# Altium footprint library 2019-09-12_16-27-42.PcbLib: 3 footprints
Each footprint in its own frame and in the unit in brackets; x right, y up, seen from the top. Pads: shape width x height; smd on the part's side, far side on the other; paste and mask are expansions set on the pad; w line width, h text height; cw(c..) or ccw(c..) is an arc to the next point about the centre after c.
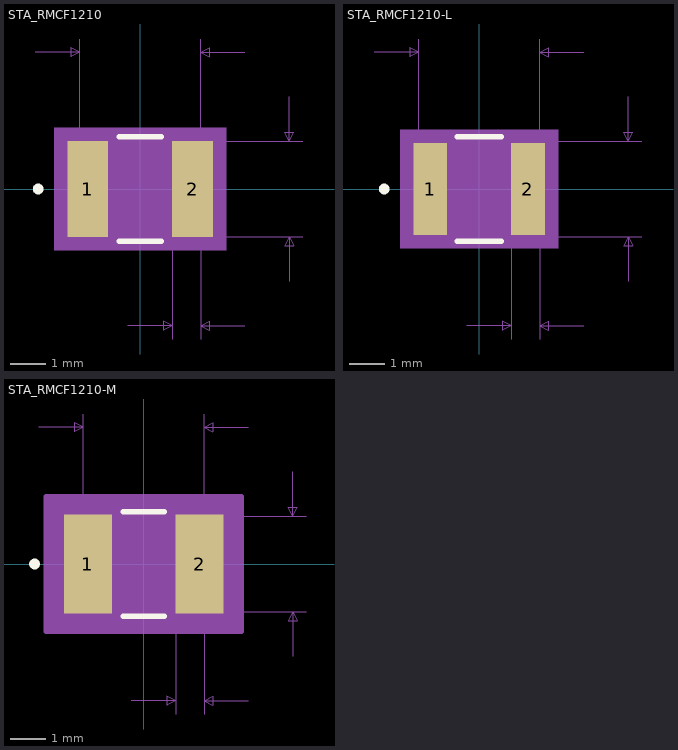
[diagram p0: the footprints below, top view; thin cyan lines are the x and y axes]

## STA_RMCF1210 [mil]
pads (2):
  rect 46x108 smd paste+0 mask+0: 1(-59,0) 2(59,0)
Top Overlay:
  circle w6: c-115,0 r3
  lines w6: -23.89,-59 23.89,-59 ; -23.89,59 23.89,59
Mechanical 5:
  region: 97,-69 -97,-69 -97,69 97,69
Mechanical 7:
  lines w1: -118,154 -68,154 ; -68,0 -68,169 ; -14,-154 36,-154 ; 0,-54 183,-54 ; 0,54 183,54 ; 36,-169 36,0 ; 68,-169 68,0 68,169 ; 118,-154 68,-154 ; 118,154 68,154 ; 168,-104 168,-54 ; 168,104 168,54 ; -68,154 -78,159 -78,149 -68,154 ; 36,-154 26,-149 26,-159 36,-154 ; 68,-154 78,-149 78,-159 68,-154 ; 68,154 78,159 78,149 68,154 ; 168,-54 163,-64 173,-64 168,-54 ; 168,54 163,64 173,64 168,54
  text "Default Padstyle: RX46Y108D0T" at -362.5,-324 h50
  text "Alt 1 Padstyle: OX60Y90D30P" at -337.5,-384 h50
  text "Alt 2 Padstyle: OX90Y60D30P" at -337.5,-444 h50
  text "0.108in/2.743mm" at 188,-12.5 h25
  text "0.136in/3.454mm" at -93.75,174 h25
  text "0.032in/0.813mm" at -41.75,-199 h25
Mechanical 13:
  circle w0: c-54,0 r3
  lines w1: -68,-54 -68,54 ; -68,-54 -36,-54 -36,54 -68,54 ; -68,-54 68,-54 ; -68,-54 -68,54 ; -68,54 68,54 ; 68,-54 36,-54 36,54 68,54 ; 68,-54 68,54 ; 68,-54 68,54
Mechanical 15:
  region: 92,-64 -92,-64 -92,64 92,64
  lines w6: -92,-64 -92,64 92,64 92,-64 -92,-64
3D body: height 10, standoff 0, extent 0,0 10,10

## STA_RMCF1210-L [mil]
pads (2):
  rect 38x104 smd paste+0 mask+0: 1(-55,0) 2(55,0)
Top Overlay:
  circle w6: c-107,0 r3
  lines w6: -24.93,-59 24.93,-59 ; -24.93,59 24.93,59
Mechanical 5:
  region: 89,-67 -89,-67 -89,67 89,67
Mechanical 7:
  lines w1: -118,154 -68,154 ; -68,0 -68,169 ; -14,-154 36,-154 ; 0,-54 183,-54 ; 0,54 183,54 ; 36,-169 36,0 ; 68,-169 68,0 68,169 ; 118,-154 68,-154 ; 118,154 68,154 ; 168,-104 168,-54 ; 168,104 168,54 ; -68,154 -78,159 -78,149 -68,154 ; 36,-154 26,-149 26,-159 36,-154 ; 68,-154 78,-149 78,-159 68,-154 ; 68,154 78,159 78,149 68,154 ; 168,-54 163,-64 173,-64 168,-54 ; 168,54 163,64 173,64 168,54
  text "Default Padstyle: RX38Y104D0T" at -362.5,-322 h50
  text "Alt 1 Padstyle: OX60Y90D30P" at -337.5,-382 h50
  text "Alt 2 Padstyle: OX90Y60D30P" at -337.5,-442 h50
  text "0.108in/2.743mm" at 188,-12.5 h25
  text "0.136in/3.454mm" at -93.75,174 h25
  text "0.032in/0.813mm" at -41.75,-199 h25
Mechanical 13:
  circle w0: c-50,0 r3
  lines w1: -68,-54 -68,54 ; -68,-54 -36,-54 -36,54 -68,54 ; -68,-54 68,-54 ; -68,-54 -68,54 ; -68,54 68,54 ; 68,-54 36,-54 36,54 68,54 ; 68,-54 68,54 ; 68,-54 68,54
Mechanical 15:
  region: 78,-56 -78,-56 -78,56 78,56
  lines w6: -78,-56 -78,56 78,56 78,-56 -78,-56
3D body: height 10, standoff 0, extent 0,0 10,10

## STA_RMCF1210-M [mil]
pads (2):
  rect 54x112 smd paste+0 mask+0: 1(-63,0) 2(63,0)
Top Overlay:
  circle w6: c-123,0 r3
  lines w6: -23.25,-59 23.25,-59 ; -23.25,59 23.25,59
Mechanical 5:
  region: 105,-71 -105,-71 -105,71 105,71
Mechanical 7:
  lines w1: -118,154 -68,154 ; -68,0 -68,169 ; -14,-154 36,-154 ; 0,-54 183,-54 ; 0,54 183,54 ; 36,-169 36,0 ; 68,-169 68,0 68,169 ; 118,-154 68,-154 ; 118,154 68,154 ; 168,-104 168,-54 ; 168,104 168,54 ; -68,154 -78,159 -78,149 -68,154 ; 36,-154 26,-149 26,-159 36,-154 ; 68,-154 78,-149 78,-159 68,-154 ; 68,154 78,159 78,149 68,154 ; 168,-54 163,-64 173,-64 168,-54 ; 168,54 163,64 173,64 168,54
  text "Default Padstyle: RX54Y112D0T" at -362.5,-326 h50
  text "Alt 1 Padstyle: OX60Y90D30P" at -337.5,-386 h50
  text "Alt 2 Padstyle: OX90Y60D30P" at -337.5,-446 h50
  text "0.108in/2.743mm" at 188,-12.5 h25
  text "0.136in/3.454mm" at -93.75,174 h25
  text "0.032in/0.813mm" at -41.75,-199 h25
Mechanical 13:
  circle w0: c-58,0 r3
  lines w1: -68,-54 -68,54 ; -68,-54 -36,-54 -36,54 -68,54 ; -68,-54 68,-54 ; -68,-54 -68,54 ; -68,54 68,54 ; 68,-54 36,-54 36,54 68,54 ; 68,-54 68,54 ; 68,-54 68,54
Mechanical 15:
  region: 110,-76 -110,-76 -110,76 110,76
  lines w6: -110,-76 -110,76 110,76 110,-76 -110,-76
3D body: height 10, standoff 0, extent 0,0 10,10